# Altium footprint library Robot.PcbLib: 113 footprints (part 4 of 8)
Each footprint in its own frame and in the unit in brackets; x right, y up, seen from the top. Pads: shape width x height; smd on the part's side, far side on the other; paste and mask are expansions set on the pad; w line width, h text height; cw(c..) or ccw(c..) is an arc to the next point about the centre after c.
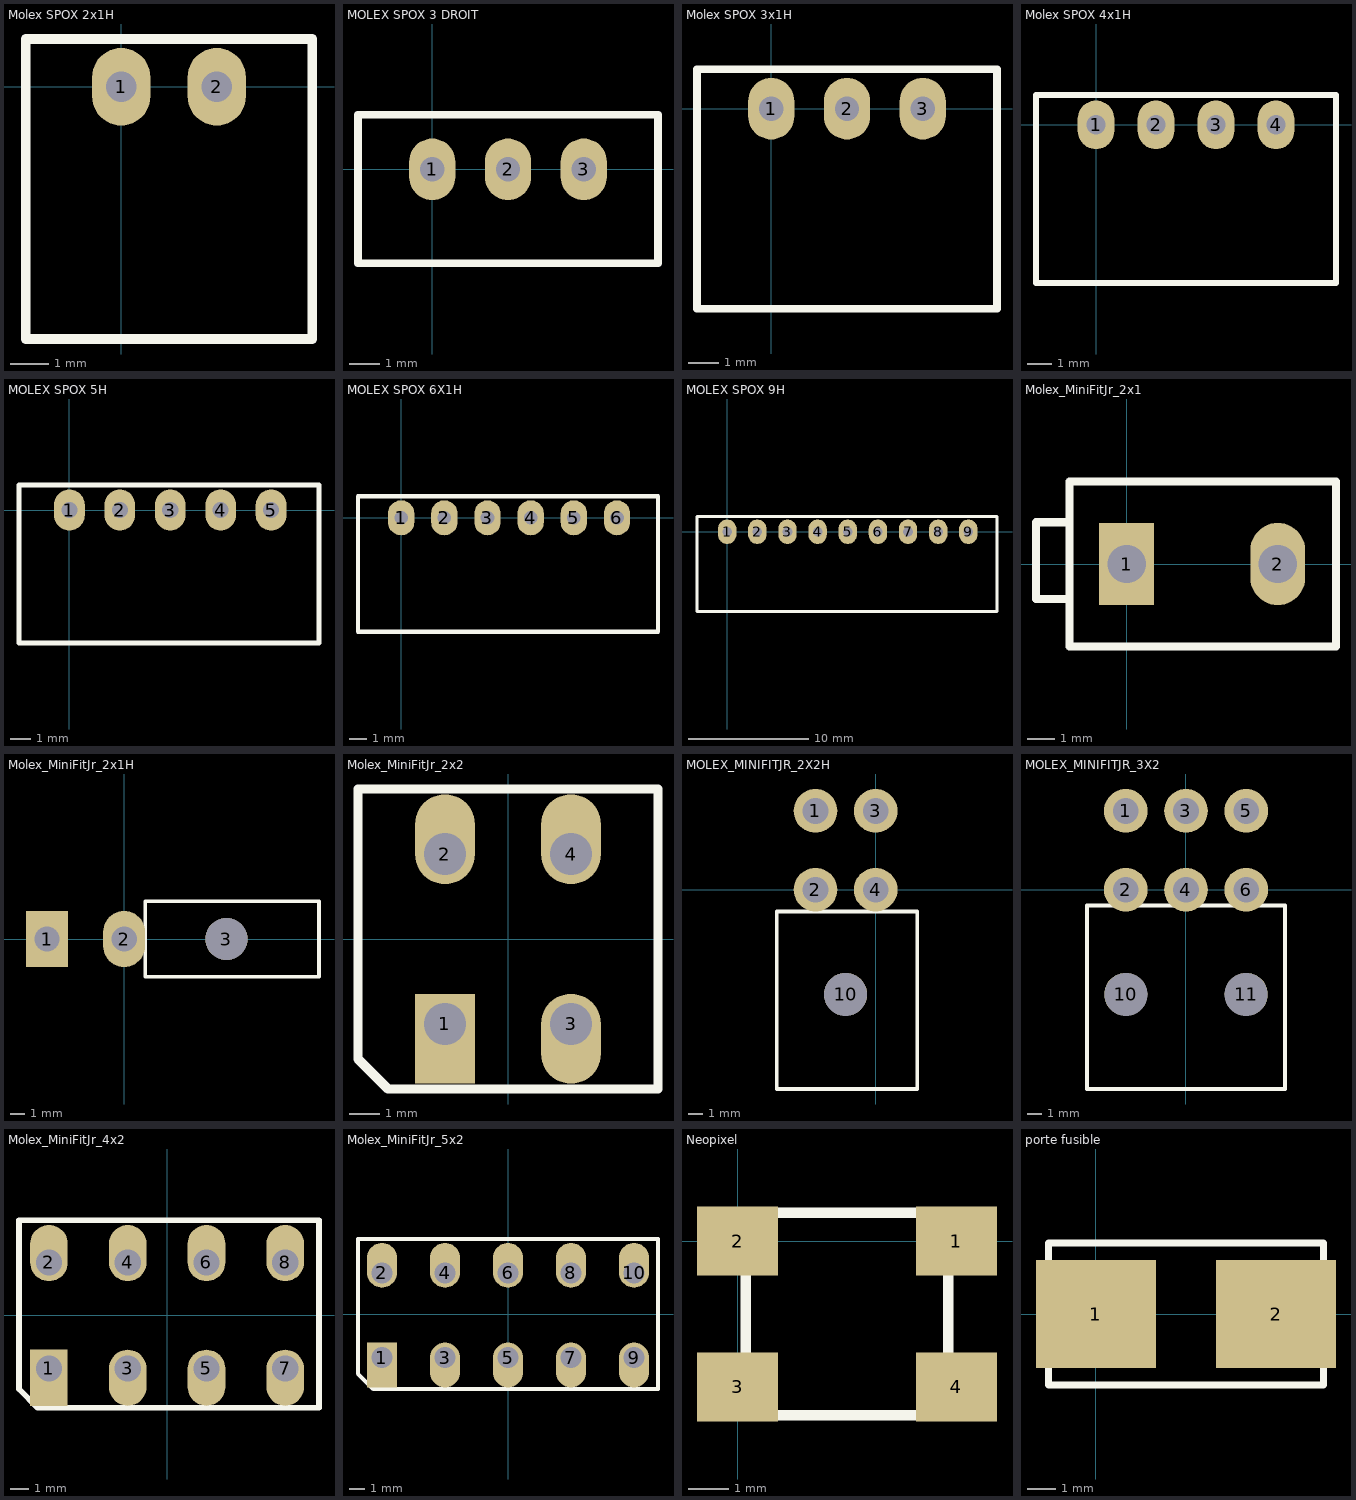
[diagram p3: the footprints below, top view; thin cyan lines are the x and y axes]

## Molex SPOX 2x1H [mil] "Prise CI, Molex, 3 Contacts, 1 rangée, entraxe 2.5mm, 3A, Coudé, ref 22-03-5035"
height 192.91
pads (2):
  oval 60x80 hole 31.5: 1(0,0) 2(98.43,0)
Top Overlay:
  lines w10: -98.43,-259.84 -98.43,49.21 196.85,49.21 196.85,-259.84 -98.43,-259.84
3D body "molex_spox_2H.stp": height 193.41, standoff -137.3, extent -98.43,-261.81 192.92,49.21

## MOLEX SPOX 3 DROIT [mil]
pads (3):
  oval 60x80 hole 31.5: 1(0,0) 2(98.43,0) 3(196.85,0)
Top Overlay:
  lines w10: -96.46,-122.05 -96.46,70.87 293.31,70.87 293.31,-122.05 -96.46,-122.05

## Molex SPOX 3x1H [mil] "Prise CI, Molex, 3 Contacts, 1 rangée, entraxe 2.5mm, 3A, Coudé, ref 22-03-5035"
height 192.91
pads (3):
  oval 60x80 hole 31.5: 1(0,0) 2(98.43,0) 3(196.85,0)
Top Overlay:
  lines w10: -96.46,-259.84 -96.46,51.18 293.31,51.18 293.31,-259.84 -96.46,-259.84
3D body "molex_spox_3H.stp": height 193.41, standoff -137.3, extent -96.46,-260.03 293.31,51

## Molex SPOX 4x1H [mil] "Prise CI, Molex, 3 Contacts, 1 rangée, entraxe 2.5mm, 3A, Coudé, ref 22-03-5035"
height 192.91
pads (4):
  oval 60x80 hole 31.5: 1(0,0) 2(98.43,0) 3(196.85,0) 4(295.28,0)
Top Overlay:
  lines w10: -98.43,-259.84 -98.43,49.21 393.7,49.21 393.7,-259.84 -98.43,-259.84
3D body "molex_spox_4H.stp": height 193.41, standoff -137.3, extent -98.42,-261.81 389.77,49.21

## MOLEX SPOX 5H [mil]
pads (5):
  oval 60x80 hole 31.5: 1(0,0) 2(98.43,0) 3(196.85,0) 4(295.28,0) 5(393.7,0)
Top Overlay:
  lines w10: -98.43,-259.84 -98.43,49.21 487.2,49.21 487.2,-259.84 -98.43,-259.84

## MOLEX SPOX 6X1H [mil] "MOLEX SPOX 6X1H, 22-05-7065"
height 192.91
pads (6):
  oval 60x80 hole 31.5: 1(0,0) 2(98.43,0) 3(196.85,0) 4(295.28,0) 5(393.7,0) 6(492.13,0)
Top Overlay:
  lines w10: -98.43,-259.84 -98.43,49.21 585.63,49.21 585.63,-259.84 -98.43,-259.84
3D body "molex_spox_6H.stp": height 193.41, standoff -137.3, extent -95.47,-259.84 589.56,51.18

## MOLEX SPOX 9H [mil]
pads (9):
  oval 60x80 hole 31.5: 1(0,0) 2(98.43,0) 3(196.85,0) 4(295.28,0) 5(393.7,0) 6(492.13,0) 7(590.55,0) 8(688.98,0) 9(787.4,0)
Top Overlay:
  lines w10: -98.43,-259.84 880.91,-259.84 880.91,49.21 -98.43,49.21 -98.43,-259.84

## Molex_MiniFitJr_2x1 [mm] "Connecteur Molex 2"
pads (2):
  rect 2x3 hole 1.4: 1(0,0)
  oval 2x3 hole 1.4: 2(5.5,0)
Top Overlay:
  lines w0.3: -2.286,-1.27 -3.302,-1.27 -3.302,1.524 -2.286,1.524 ; -2.08,-3 -2.08,-1.778 -2.08,3 7.62,3 7.62,-3 -2.08,-3
3D body "Molex_MinifitJr_2D.stp": height 12.61, standoff -3.69, extent -3.302,-3.1 7.698,3.1

## Molex_MiniFitJr_2x1H [mm] "Connecteur Molex 2"
height 10
pads (3):
  rect 3x4 hole 1.8: 1(-5.5,0)
  oval 3x4 hole 1.8: 2(0,0)
  round 3 hole 3 unplated: 3(7.3,0)
Top Overlay:
  lines w0.254: 8.5,-2.7 1.5,-2.7 ; 1.5,-2.7 13.9,-2.7 13.9,2.7 1.5,2.7 1.5,-2.7
3D body "molex_minifitjr_2x1H.stp": height 11.01, standoff -3.99, extent -6.035,-2.7 13.9,3.1

## Molex_MiniFitJr_2x2 [mm] "Conecteur puissance 2x2"
pads (4):
  rect 2x3 hole 1.4 copper offset 0,-0.5: 1(-2.1,-2.825)
  oval 2x3 hole 1.4 copper offset 0,0.5: 2(-2.1,2.825) 4(2.1,2.825)
  oval 2x3 hole 1.4 copper offset 0,-0.5: 3(2.1,-2.825)
Top Overlay:
  lines w0.3: -5,-4 -4,-5 5,-5 5,5 -5,5 -5,-4

## MOLEX_MINIFITJR_2X2H [mm] "MOLEX_MINIFITJR_3X2, 39-30-1060"
height 9.6
pads (5):
  round 3.048 hole 1.8: 1(-4.2,5.5) 2(-4.2,0) 3(0,5.5) 4(0,0)
  round 3 hole 3 unplated: 10(-2.1,-7.3)
Top Overlay:
  lines w0.254: -6.9,-13.9 -6.9,-1.524 2.9,-1.524 2.9,-13.9 -6.9,-13.9
3D body "39301040.stp": height 11.4, standoff -3.6, extent -6.876,-13.904 3.124,6.03

## MOLEX_MINIFITJR_3X2 [mm] "MOLEX_MINIFITJR_3X2, 39-30-1060"
height 9.6
pads (8):
  round 3.048 hole 1.8: 1(-4.2,5.5) 2(-4.2,0) 3(0,5.5) 4(0,0) 5(4.2,5.5) 6(4.2,0)
  round 3 hole 3 unplated: 10(-4.2,-7.3) 11(4.2,-7.3)
Top Overlay:
  lines w0.254: -6.9,-13.9 6.9,-13.9 6.9,-1.1 -6.9,-1.1 -6.9,-13.9
3D body "MiniFit_Jr_3x2.stp": height 11.41, standoff -3.59, extent -6.9,-13.9 7.3,6.035

## Molex_MiniFitJr_4x2 [mm] "Connecteur Molex 5x2"
pads (8):
  rect 2x3 hole 1.4 copper offset 0,-0.5: 1(-6.3,-2.825)
  oval 2x3 hole 1.4 copper offset 0,0.5: 2(-6.3,2.825) 4(-2.1,2.825) 6(2.1,2.825) 8(6.3,2.825)
  oval 2x3 hole 1.4 copper offset 0,-0.5: 3(-2.1,-2.825) 5(2.1,-2.825) 7(6.3,-2.825)
Top Overlay:
  lines w0.3: -7.9,-3.925 -6.9,-4.925 8.1,-4.925 8.1,5.075 -7.9,5.075 -7.9,-3.925

## Molex_MiniFitJr_5x2 [mm] "Connecteur Molex 5x2"
pads (10):
  rect 2x3 hole 1.4 copper offset 0,-0.5: 1(-8.4,-2.9)
  oval 2x3 hole 1.4 copper offset 0,0.5: 2(-8.4,2.75) 4(-4.2,2.75) 6(0,2.75) 8(4.2,2.75) 10(8.4,2.75)
  oval 2x3 hole 1.4 copper offset 0,-0.5: 3(-4.2,-2.9) 5(0,-2.9) 7(4.2,-2.9) 9(8.4,-2.9)
Top Overlay:
  lines w0.3: -10,-4 -10,5 10,5 10,-5 -9,-5 -10,-4

## Neopixel [mm]
pads (4):
  rect 2x1.7 smd: 1(5.4,0) 2(0,0) 3(0,-3.6) 4(5.4,-3.6)
Top Overlay:
  lines w0.254: 0.2,-4.3 0.2,0.2 0.7,0.7 5.2,0.7 5.2,-4.3 0.2,-4.3
3D body: height 2, standoff 1, extent 0.693,-3.803 4.693,0.196
3D body: height 1.6, standoff 0, extent 0.192,-4.329 5.193,0.672

## porte fusible [mil] "littelfuse"
pads (2):
  rect 167x150 smd: 1(0,0) 2(251,0)
Top Overlay:
  lines w10: -66,-99 317,-99 317,99 -66,99 -66,-99